# Altium footprint library MasterLib.PcbLib: 54 footprints (part 2 of 4)
Each footprint in its own frame and in the unit in brackets; x right, y up, seen from the top. Pads: shape width x height; smd on the part's side, far side on the other; paste and mask are expansions set on the pad; w line width, h text height; cw(c..) or ccw(c..) is an arc to the next point about the centre after c.
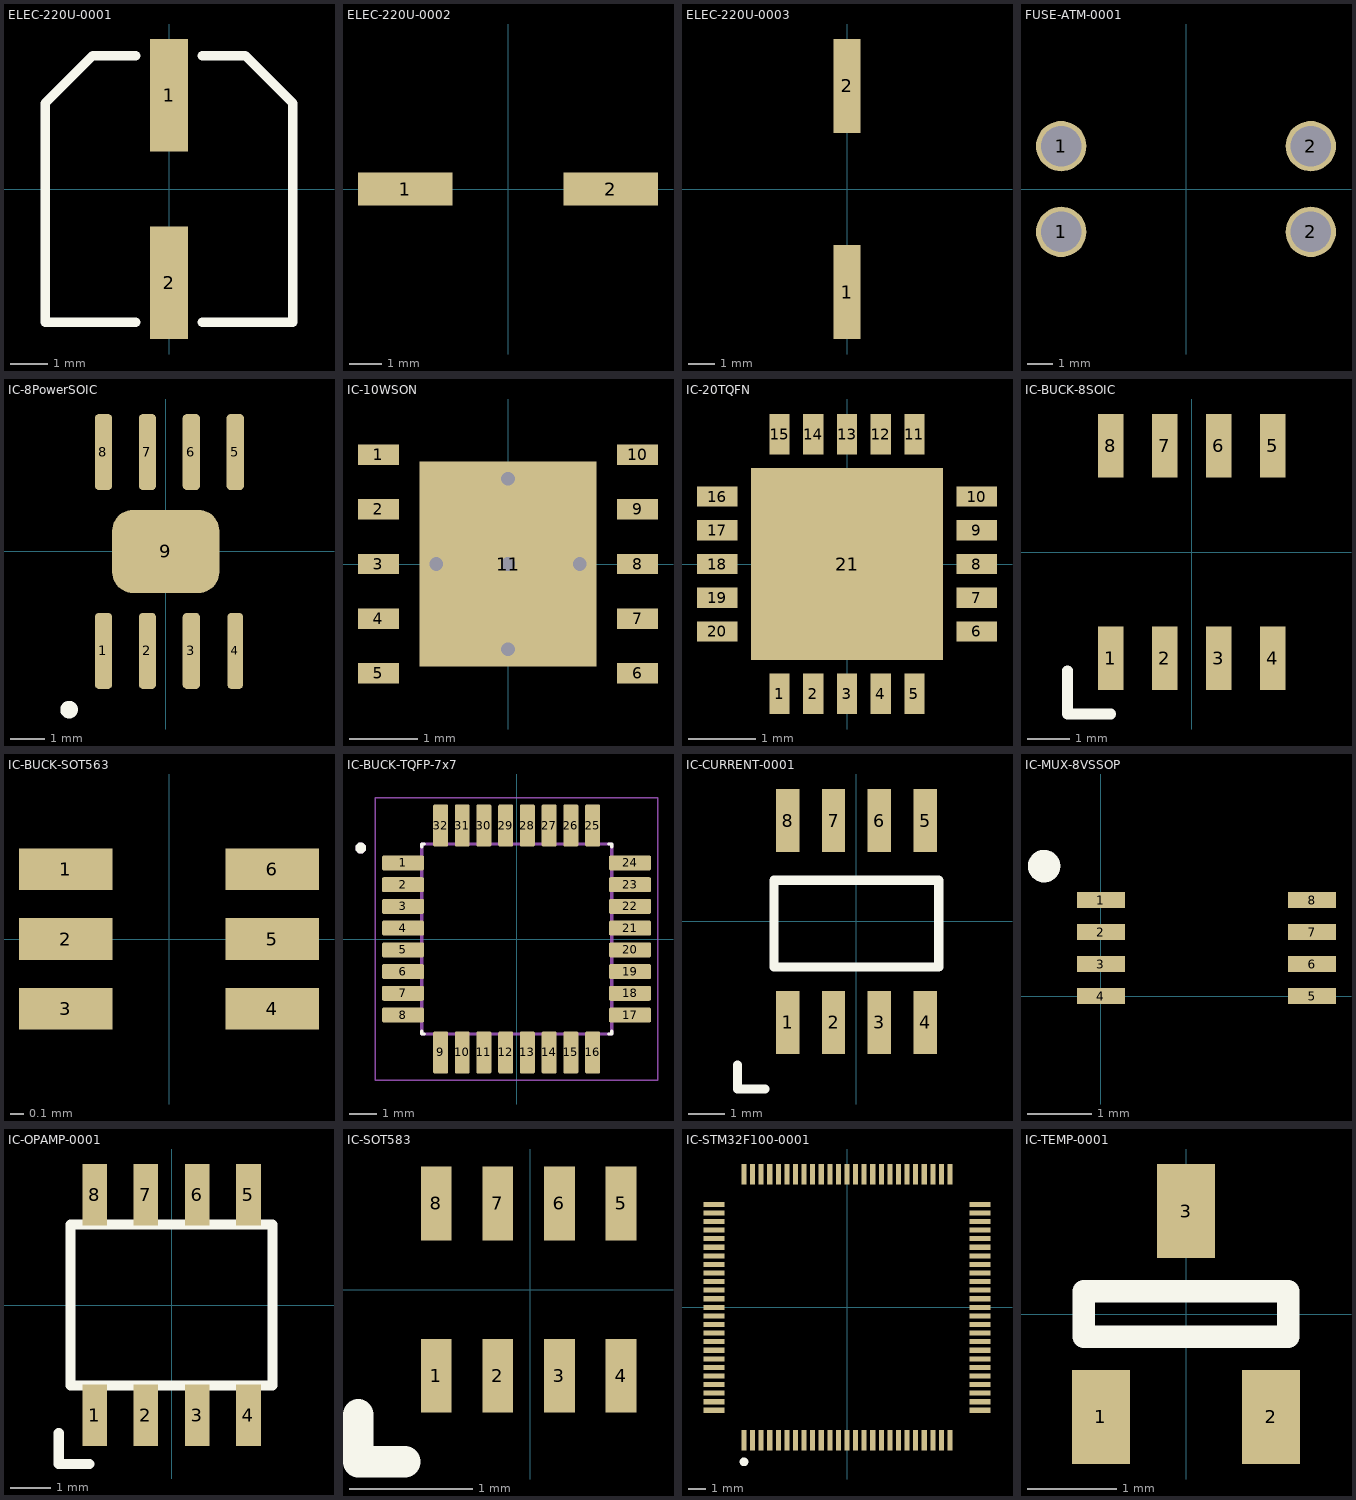
[diagram p1: the footprints below, top view; thin cyan lines are the x and y axes]

## ELEC-220U-0001 [mm]
pads (2):
  rect 1x3 smd: 1(0,2.5) 2(0,-2.5)
Top Overlay:
  lines w0.254: -0.889,-3.556 -3.302,-3.556 -3.302,2.286 -2.032,3.556 -0.889,3.556 ; 0.889,-3.556 3.302,-3.556 3.302,2.286 2.032,3.556 0.889,3.556
3D body "UUD1C221MCL1GS.STEP": height 7.95, standoff -0.05, extent -3.3,-3.5 3.3,3.5

## ELEC-220U-0002 [mm]
pads (2):
  rect 2.9x1 smd: 1(-3.15,0) 2(3.15,0)
3D body "CAP_J-V_8X10P5_RUB.step": height 10.54, standoff 0, extent -4.445,-4.254 4.445,4.254

## ELEC-220U-0003 [mm]
pads (2):
  rect 1x3.5 smd: 1(0,-3.85) 2(0,3.85)
3D body "CAP_J-V_10X10P5_RUB.step": height 10.54, standoff 0, extent -5.245,-5.448 5.245,5.448

## FUSE-ATM-0001 [mm]
pads (4):
  round 2 hole 1.6: 1(-4.95,-1.7) 1(-4.95,1.7) 2(4.95,-1.7) 2(4.95,1.7)
3D body "3568.STEP": height 7.37, standoff -2.79, extent -8.001,-3.365 8.001,3.365

## IC-8PowerSOIC [mm]
pads (9):
  rrect50% 0.5x2.2 smd mask+0.07: 1(-1.8,-2.875) 2(-0.53,-2.875) 3(0.74,-2.875) 5(2.01,2.875) 6(0.74,2.875) 7(-0.53,2.875) 8(-1.8,2.875)
  rrect50% 0.45x2.2 smd mask+0.07: 4(2.01,-2.875)
  rrect50% 3.1x2.4 smd: 9(0,0)
Top Overlay:
  circle w0.254: c-2.794,-4.572 r0.127
3D body "LMR16030SDDA.STEP": height 1.7, standoff 0, extent -2.35,-3 2.55,3

## IC-10WSON [mm]
pads (11):
  rect 0.6x0.3 smd: 1(-1.9,1.6) 2(-1.9,0.8) 3(-1.9,0) 4(-1.9,-0.8) 5(-1.9,-1.6) 6(1.9,-1.6) 7(1.9,-0.8) 8(1.9,0) 9(1.9,0.8) 10(1.9,1.6)
  rect 2.6x3 smd: 11(0,0)
via -1.05,0 diameter 0.45 hole 0.2
via 0,-1.25 diameter 0.45 hole 0.2
via 0,1.25 diameter 0.45 hole 0.2
via 1.05,0 diameter 0.45 hole 0.2
via 0,0 diameter 0.45 hole 0.2
3D body "LMR14050SQDPRRQ1--3DModel-STEP-56544.STEP": height 0.8, standoff 0, extent -2,-2 2,2

## IC-20TQFN [mm]
pads (21):
  rect 0.3x0.6 smd: 1(-1,-1.925) 2(-0.5,-1.925) 3(0,-1.925) 4(0.5,-1.925) 5(1,-1.925) 11(1,1.925) 12(0.5,1.925) 13(0,1.925) 14(-0.5,1.925) 15(-1,1.925)
  rect 0.6x0.3 smd: 6(1.925,-1) 7(1.925,-0.5) 8(1.925,0) 9(1.925,0.5) 10(1.925,1) 16(-1.925,1) 17(-1.925,0.5) 18(-1.925,0) 19(-1.925,-0.5) 20(-1.925,-1)
  rect 2.85x2.85 smd: 21(0,0)
3D body "MAX16004BTP+T.STEP": height 0.8, standoff 0, extent -2,-2 2,2

## IC-BUCK-8SOIC [mm]
pads (8):
  rect 0.6x1.5 smd: 1(-1.905,-2.5) 2(-0.635,-2.5) 3(0.635,-2.5) 4(1.905,-2.5) 5(1.905,2.5) 6(0.635,2.5) 7(-0.635,2.5) 8(-1.905,2.5)
Top Overlay:
  lines w0.254: -2.921,-2.794 -2.921,-3.81 -1.905,-3.81
3D body "SOIC-8_3.9x4.9mm_P1.27mm.step": height 1.75, standoff 0, extent -2.45,-3 2.45,3

## IC-BUCK-SOT563 [mm]
pads (6):
  rect 0.67x0.3 smd: 1(-0.74,0.5) 2(-0.74,0) 3(-0.74,-0.5) 4(0.74,-0.5) 5(0.74,0) 6(0.74,0.5)
3D body "ESDA14V2BP6.STEP": height 0.6, standoff 0, extent -0.8,-0.8 0.8,0.8

## IC-BUCK-TQFP-7x7 [mm]
pads (32):
  rrect25% 1.56x0.55 smd: 1(-4.18,2.8) 2(-4.18,2) 3(-4.18,1.2) 4(-4.18,0.4) 5(-4.18,-0.4) 6(-4.18,-1.2) 7(-4.18,-2) 8(-4.18,-2.8) 17(4.18,-2.8) 18(4.18,-2) 19(4.18,-1.2) 20(4.18,-0.4) 21(4.18,0.4) 22(4.18,1.2) 23(4.18,2) 24(4.18,2.8)
  rrect25% 0.55x1.56 smd: 9(-2.8,-4.18) 10(-2,-4.18) 11(-1.2,-4.18) 12(-0.4,-4.18) 13(0.4,-4.18) 14(1.2,-4.18) 15(2,-4.18) 16(2.8,-4.18) 25(2.8,4.18) 26(2,4.18) 27(1.2,4.18) 28(0.4,4.18) 29(-0.4,4.18) 30(-1.2,4.18) 31(-2,4.18) 32(-2.8,4.18)
Top Overlay:
  circle w0.2: c-5.74,3.35 r0.1
  lines w0.127: -3.5,-3.395 -3.5,-3.5 -3.395,-3.5 ; -3.5,3.395 -3.5,3.5 -3.395,3.5 ; 3.395,-3.5 3.5,-3.5 3.5,-3.395 ; 3.395,3.5 3.5,3.5 3.5,3.395
Mechanical 13:
  circle w0.2: c-5.74,3.35 r0.1
  lines w0.127: -3.5,-3.5 3.5,-3.5 3.5,3.5 -3.5,3.5 -3.5,-3.5
Mechanical 15:
  lines w0.05: -5.21,-5.21 5.21,-5.21 5.21,5.21 -5.21,5.21 -5.21,-5.21
3D body "step_temp.STEP": height 1.2, standoff 0, extent -4.5,-4.5 4.5,4.5

## IC-CURRENT-0001 [mm]
pads (8):
  rect 0.65x1.75 smd: 1(-1.905,-2.8) 2(-0.635,-2.8) 3(0.635,-2.8) 4(1.905,-2.8) 5(1.905,2.8) 6(0.635,2.8) 7(-0.635,2.8) 8(-1.905,2.8)
Top Overlay:
  lines w0.254: -3.302,-4.429 -3.302,-4.651 -2.54,-4.651 ; -3.302,-4.397 -3.302,-3.985 ; -2.286,-1.27 2.286,-1.27 2.286,1.143 -2.286,1.143 -2.286,-1.27

## IC-MUX-8VSSOP [mm]
pads (8):
  rect 0.75x0.25 smd: 1(0,1.5) 2(0,1) 3(0,0.5) 4(0,0) 5(3.3,0) 6(3.3,0.5) 7(3.3,1) 8(3.3,1.5)
Top Overlay:
  circle w0.254: c-0.889,2.032 r0.127
3D body "SN74LVC2G157DCUR.STEP": height 0.9, standoff 0, extent 0.101,-0.238 3.201,1.762

## IC-OPAMP-0001 [mil]
pads (8):
  rect 24x60 smd: 1(-75,-107.5) 2(-25,-107.5) 3(25,-107.5) 4(75,-107.5) 5(75,107.5) 6(25,107.5) 7(-25,107.5) 8(-75,107.5)
Top Overlay:
  lines w10: -110,-125 -110,-155 -80,-155 ; -98.5,-78.5 -98.5,78.5 98.5,78.5 98.5,-78.5 -98.5,-78.5
3D body "SOIC-8_3.9x4.9mm_P1.27mm.step": height 68.9, standoff 0, extent -96.46,-118.11 96.45,118.11

## IC-SOT583 [mm]
pads (8):
  rect 0.25x0.6 smd: 1(-0.762,-0.7) 2(-0.262,-0.7) 3(0.238,-0.7) 4(0.738,-0.7) 5(0.738,0.7) 6(0.238,0.7) 7(-0.262,0.7) 8(-0.762,0.7)
Top Overlay:
  lines w0.254: -1.397,-1.016 -1.397,-1.397 -1.016,-1.397
3D body "SOT583_MP2182_MNP.step": height 0.56, standoff 0, extent -1.105,-0.851 1.105,0.851

## IC-STM32F100-0001 [mm] "STM32F100VBT7b"
pads (100):
  rect 0.3x1.2 smd: 1(-6,-7.75) 2(-5.5,-7.75) 3(-5,-7.75) 4(-4.5,-7.75) 5(-4,-7.75) 6(-3.5,-7.75) 7(-3,-7.75) 8(-2.5,-7.75) 9(-2,-7.75) 10(-1.5,-7.75) 11(-1,-7.75) 12(-0.5,-7.75) 13(0,-7.75) 14(0.5,-7.75) 15(1,-7.75) 16(1.5,-7.75) 17(2,-7.75) 18(2.5,-7.75) 19(3,-7.75) 20(3.5,-7.75) 21(4,-7.75) 22(4.5,-7.75) 23(5,-7.75) 24(5.5,-7.75) 25(6,-7.75) 51(6,7.75) 52(5.5,7.75) 53(5,7.75) 54(4.5,7.75) 55(4,7.75) 56(3.5,7.75) 57(3,7.75) 58(2.5,7.75) 59(2,7.75) 60(1.5,7.75) 61(1,7.75) 62(0.5,7.75) 63(0,7.75) 64(-0.5,7.75) 65(-1,7.75) 66(-1.5,7.75) 67(-2,7.75) 68(-2.5,7.75) 69(-3,7.75) 70(-3.5,7.75) 71(-4,7.75) 72(-4.5,7.75) 73(-5,7.75) 74(-5.5,7.75) 75(-6,7.75)
  rect 1.2x0.3 smd: 26(7.75,-6) 27(7.75,-5.5) 28(7.75,-5) 29(7.75,-4.5) 30(7.75,-4) 31(7.75,-3.5) 32(7.75,-3) 33(7.75,-2.5) 34(7.75,-2) 35(7.75,-1.5) 36(7.75,-1) 37(7.75,-0.5) 38(7.75,0) 39(7.75,0.5) 40(7.75,1) 41(7.75,1.5) 42(7.75,2) 43(7.75,2.5) 44(7.75,3) 45(7.75,3.5) 46(7.75,4) 47(7.75,4.5) 48(7.75,5) 49(7.75,5.5) 50(7.75,6) 76(-7.75,6) 77(-7.75,5.5) 78(-7.75,5) 79(-7.75,4.5) 80(-7.75,4) 81(-7.75,3.5) 82(-7.75,3) 83(-7.75,2.5) 84(-7.75,2) 85(-7.75,1.5) 86(-7.75,1) 87(-7.75,0.5) 88(-7.75,0) 89(-7.75,-0.5) 90(-7.75,-1) 91(-7.75,-1.5) 92(-7.75,-2) 93(-7.75,-2.5) 94(-7.75,-3) 95(-7.75,-3.5) 96(-7.75,-4) 97(-7.75,-4.5) 98(-7.75,-5) 99(-7.75,-5.5) 100(-7.75,-6)
Top Overlay:
  circle w0.254: c-6,-9 r0.127
3D body "LQFP100-14x14mm.step": height 1.6, standoff 0, extent -7.997,-7.997 7.997,7.997

## IC-TEMP-0001 [mm]
pads (3):
  rect 0.65x1.05 smd: 1(-0.95,-1.15) 2(0.95,-1.15) 3(0,1.15)
Top Overlay:
  lines w0.254: -1.143,-0.254 1.143,-0.254 1.143,0.254 -1.143,0.254 -1.143,-0.254